# Altium schematic symbol library Dioneya.SchLib: 2 symbols
Pins are listed as number, name and electrical type; pins without a type are passive.

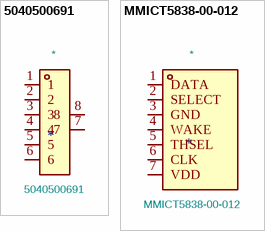
[diagram p0: symbols 5040500691 to MMICT5838-00-012]

## 5040500691
designator *  value 5040500691
Manufacturer: MOLEX; ki_keywords: Wire To Board / Wire To Wire Connector; Footprint: Dioneya:Molex_5040500691; Supplier: https://www.lcsc.com/datasheet/C563981.pdf; MPN: 5040500691; LCSC Part: C563981
footprint Molex_5040500691
pins: 1, 2, 3, 4, 5, 6, 7, 8

## MMICT5838-00-012
designator *  value MMICT5838-00-012
Manufacturer: TDK InvenSense(应美盛); ki_keywords: MEMS Microphones; Footprint: Dioneya:T5838_RevA; Supplier: https://www.lcsc.com/datasheet/C7230692.pdf; MPN: MMICT5838-00-012; LCSC Part: C7230692
footprint T5838_RevA
pins: 1 DATA, 2 SELECT, 3 GND, 4 WAKE, 5 THSEL, 6 CLK, 7 VDD